# Altium footprint library MKP63_300~Y2_472.PcbLib: 1 footprints
Each footprint in its own frame and in the unit in brackets; x right, y up, seen from the top. Pads: shape width x height; smd on the part's side, far side on the other; paste and mask are expansions set on the pad; w line width, h text height; cw(c..) or ccw(c..) is an arc to the next point about the centre after c.
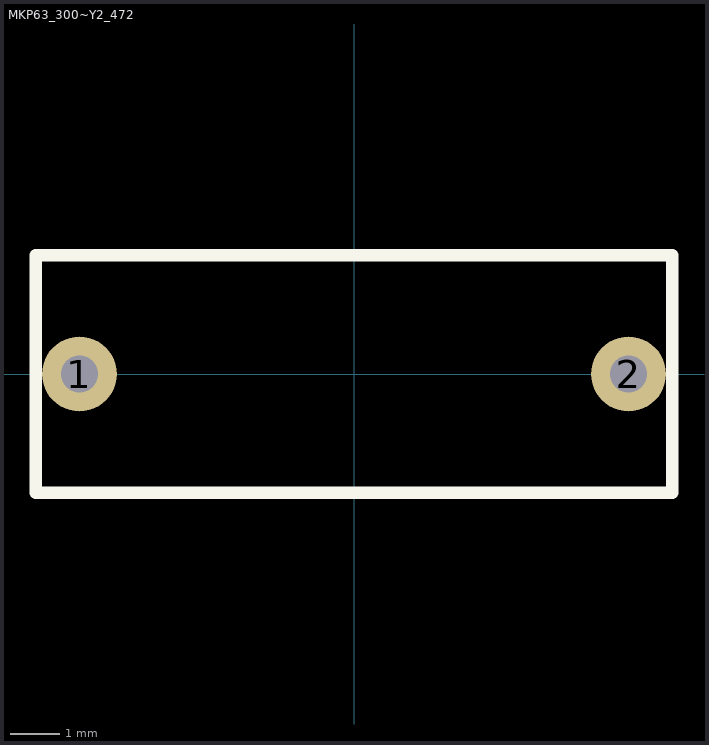
[diagram p0: the footprint, top view; thin cyan lines are the x and y axes]

## MKP63_300~Y2_472 [mil] "MKP63_300~Y2_472"
pads (2):
  round 60 hole 30: 1(-220,0) 2(220,0)
Top Overlay:
  lines w10: -255,-95 255,-95 255,95 -255,95 -255,-95
3D body "4.7nf Y2.x_t": height 433.46, standoff -157.48, extent -255.91,-96.46 255.91,96.46